# Altium footprint library ATK-CNN647B_V1.0.PcbLib: 22 footprints (part 1 of 2)
Each footprint in its own frame and in the unit in brackets; x right, y up, seen from the top. Pads: shape width x height; smd on the part's side, far side on the other; paste and mask are expansions set on the pad; w line width, h text height; cw(c..) or ccw(c..) is an arc to the next point about the centre after c.
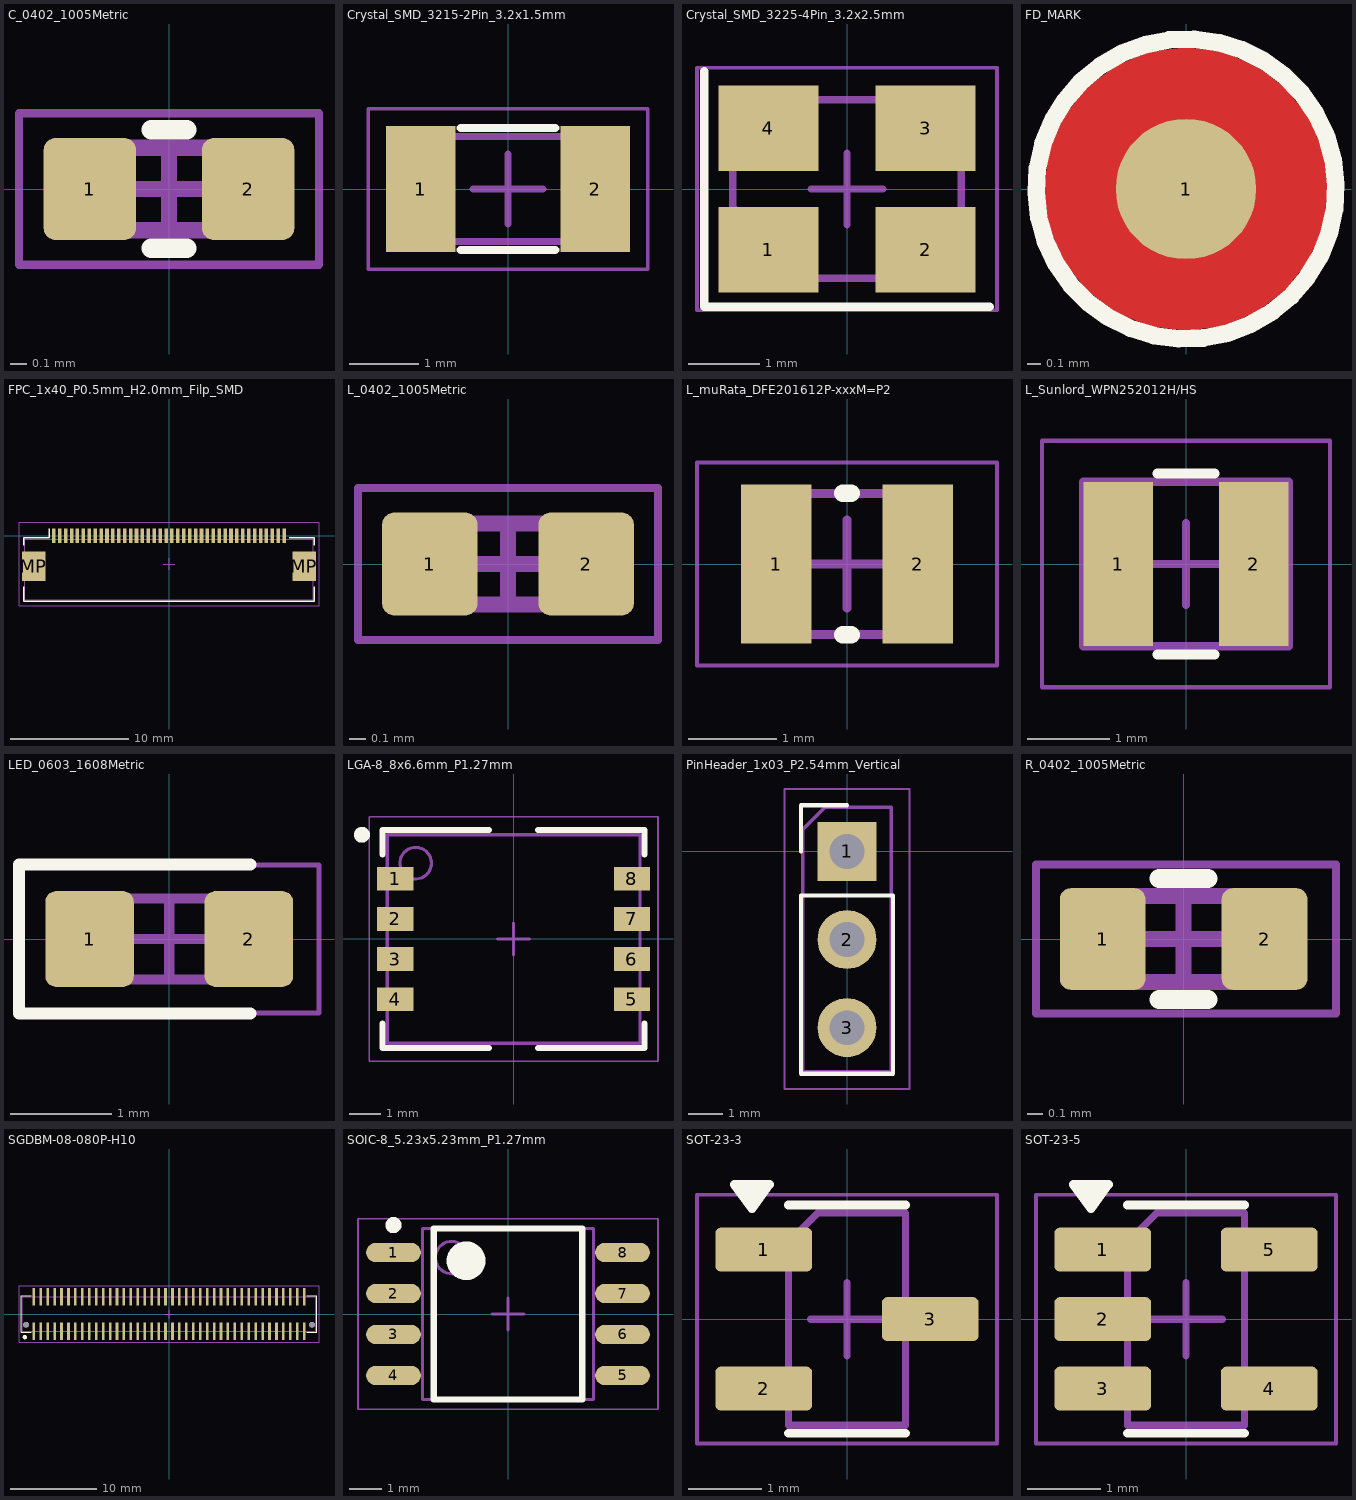
[diagram p0: the footprints below, top view; thin cyan lines are the x and y axes]

## C_0402_1005Metric [mm]
pads (2):
  rrect25% 0.56x0.62 smd: 1(-0.48,0) 2(0.48,0)
Top Overlay:
  lines w0.12: -0.108,-0.36 0.108,-0.36 ; -0.108,0.36 0.108,0.36
Mechanical 13:
  lines w0.1: -0.5,-0.25 -0.5,0.25 0.5,0.25 0.5,-0.25 -0.5,-0.25
Mechanical 15:
  lines w0.05: -0.91,-0.46 -0.91,0.46 0.91,0.46 0.91,-0.46 -0.91,-0.46
  lines w0.1: -0.25,0 0.25,0 ; 0,-0.25 0,0.25
3D body "C_0402_1005Metric.step": height 0.5, standoff 0, extent -0.5,-0.25 0.5,0.25

## Crystal_SMD_3215-2Pin_3.2x1.5mm [mm]
height 0.9
pads (2):
  rect 1x1.8 smd: 1(-1.25,0) 2(1.25,0)
Top Overlay:
  lines w0.12: -0.675,-0.875 0.675,-0.875 ; -0.675,0.875 0.675,0.875
Mechanical 13:
  lines w0.1: -1.6,-0.75 1.6,-0.75 1.6,0.75 -1.6,0.75 -1.6,-0.75
Mechanical 15:
  lines w0.05: -2,-1.15 -2,1.15 2,1.15 2,-1.15 -2,-1.15
  lines w0.1: -0.5,0 0.5,0 ; 0,-0.5 0,0.5
3D body "User Library-NDK_NX3215SA.STEP": height 0.8, standoff 0, extent -1.6,-0.75 1.6,0.75

## Crystal_SMD_3225-4Pin_3.2x2.5mm [mm]
height 0.9
pads (4):
  rect 1.4x1.2 smd: 1(-1.1,-0.85) 2(1.1,-0.85) 3(1.1,0.85) 4(-1.1,0.85)
Top Overlay:
  lines w0.12: -2,1.65 -2,-1.65 2,-1.65
Mechanical 13:
  lines w0.1: -1.6,-0.25 -1.6,1.25 1.6,1.25 1.6,-1.25 -0.6,-1.25 -1.6,-0.25
Mechanical 15:
  lines w0.05: -2.1,-1.7 -2.1,1.7 2.1,1.7 2.1,-1.7 -2.1,-1.7
  lines w0.1: -0.5,0 0.5,0 ; 0,-0.5 0,0.5
3D body "Crystal_SMD_3225-4Pin_3.2x2.5mm.step": height 0.64, standoff 0, extent -1.599,-1.251 1.601,1.25

## FD_MARK [mil]
height 39.37
pads (1):
  round 40 smd: 1(0,0)
Top Layer:
  pour cut-out: -40.43,0 -39.06,-10.47 -35.02,-20.22 -28.59,-28.59 -20.22,-35.02 -10.47,-39.06 0,-40.43 10.47,-39.06 20.22,-35.02 28.59,-28.59 35.02,-20.22 39.06,-10.47 40.43,0 39.06,10.47 35.02,20.22 28.59,28.59 20.22,35.02 10.47,39.06 0,40.43 -10.47,39.06 -20.22,35.02 -28.59,28.59 -35.02,20.22 -39.06,10.47
Top Overlay:
  lines w5: -40.03,-14.92 cw(c0,0) -39.9,-15.25
Top Solder:
  circle w30: c0,0 r24.49

## FPC_1x40_P0.5mm_H2.0mm_Filp_SMD [mm]
height 0.9
pads (42):
  rect 0.3x1.25 smd: 1(-9.75,0) 2(-9.25,0) 3(-8.75,0) 4(-8.25,0) 5(-7.75,0) 6(-7.25,0) 7(-6.75,0) 8(-6.25,0) 9(-5.75,0) 10(-5.25,0) 11(-4.75,0) 12(-4.25,0) 13(-3.75,0) 14(-3.25,0) 15(-2.75,0) 16(-2.25,0) 17(-1.75,0) 18(-1.25,0) 19(-0.75,0) 20(-0.25,0) 21(0.25,0) 22(0.75,0) 23(1.25,0) 24(1.75,0) 25(2.25,0) 26(2.75,0) 27(3.25,0) 28(3.75,0) 29(4.25,0) 30(4.75,0) 31(5.25,0) 32(5.75,0) 33(6.25,0) 34(6.75,0) 35(7.25,0) 36(7.75,0) 37(8.25,0) 38(8.75,0) 39(9.25,0) 40(9.75,0)
  rect 2x2.5 smd: MP(-11.44,-2.575) MP(11.44,-2.575)
Top Overlay:
  lines w0.12: -12.31,-4.325 -12.31,-5.535 12.31,-5.535 12.31,-4.325 ; -12.31,-0.825 -12.31,-0.195 -10.16,-0.195 -10.16,0.565 ; 10.16,-0.195 12.31,-0.195 12.31,-0.825
Mechanical 13:
  lines w0.1: -12.2,-5.425 12.2,-5.425 12.2,-0.305 -12.2,-0.305 -12.2,-5.425
Mechanical 15:
  lines w0.05: -12.7,-5.925 12.7,-5.925 12.7,1.125 -12.7,1.125 -12.7,-5.925
  lines w0.1: -0.5,-2.4 0.5,-2.4 ; 0,-2.9 0,-1.9
3D body "FPC_1x40_P0.5mm_H2.0mm_Filp_SMD v1.step": height 2, standoff 0, extent -12.2,-5.425 12.2,0.175

## L_0402_1005Metric [mm]
height 0.9
pads (2):
  rrect25% 0.59x0.64 smd: 1(-0.485,0) 2(0.485,0)
Mechanical 13:
  lines w0.1: -0.5,-0.25 0.5,-0.25 0.5,0.25 -0.5,0.25 -0.5,-0.25
Mechanical 15:
  lines w0.05: -0.93,-0.47 -0.93,0.47 0.93,0.47 0.93,-0.47 -0.93,-0.47
  lines w0.1: -0.25,0 0.25,0 ; 0,-0.25 0,0.25
3D body "L_0402_1005Metric.step": height 0.5, standoff 0, extent -0.5,-0.25 0.5,0.25

## L_muRata_DFE201612P-xxxM=P2 [mm]
height 1.2
pads (2):
  rect 0.8x1.8 smd: 1(-0.8,0) 2(0.8,0)
Top Overlay:
  lines w0.2: -0.05,-0.8 0.05,-0.8 ; -0.05,0.8 0.05,0.8
Mechanical 13:
  lines w0.1: -1,-0.8 1,-0.8 1,0.8 -1,0.8 -1,-0.8
Mechanical 15:
  lines w0.05: -1.7,-1.15 1.7,-1.15 1.7,1.15 -1.7,1.15 -1.7,-1.15
  lines w0.1: -0.5,0 0.5,0 ; 0,-0.5 0,0.5
3D body "Chip2PinSM127P600-8N.step": height 1.2, standoff 0, extent -1,-0.8 1,0.8

## L_Sunlord_WPN252012H/HS [mm]
height 1.2
pads (2):
  rect 0.85x2 smd: 1(-0.825,0) 2(0.825,0)
Top Overlay:
  lines w0.12: -0.35,-1.1 0.35,-1.1 ; -0.35,1.1 0.35,1.1
Mechanical 13:
  lines w0.1: -1.25,-1 1.25,-1 1.25,1 -1.25,1 -1.25,-1
Mechanical 15:
  lines w0.05: -1.75,-1.5 -1.75,1.5 1.75,1.5 1.75,-1.5 -1.75,-1.5
  lines w0.1: -0.5,0 0.5,0 ; 0,-0.5 0,0.5
3D body "L_Wuerth_MAPI-2512.step": height 1.2, standoff 0, extent -1.25,-1 1.25,1

## LED_0603_1608Metric [mm]
height 0.9
pads (2):
  rrect25% 0.875x0.95 smd: 1(-0.787,0) 2(0.787,0)
Top Overlay:
  lines w0.12: 0.8,-0.735 -1.485,-0.735 -1.485,0.735 0.8,0.735
Mechanical 13:
  lines w0.1: -0.8,-0.4 -0.8,0.1 -0.5,0.4 0.8,0.4 0.8,-0.4 -0.8,-0.4
Mechanical 15:
  lines w0.05: -1.48,-0.73 -1.48,0.73 1.48,0.73 1.48,-0.73 -1.48,-0.73
  lines w0.1: -0.4,0 0.4,0 ; 0,-0.4 0,0.4
3D body "LED_0603_1608Metric.step": height 1.1, standoff 0, extent -0.8,-0.4 0.8,0.4

## LGA-8_8x6.6mm_P1.27mm [mm]
height 0.85
pads (8):
  rect 1.15x0.75 smd: 1(-3.75,1.905) 2(-3.75,0.635) 3(-3.75,-0.635) 4(-3.75,-1.905) 5(3.75,-1.905) 6(3.75,-0.635) 7(3.75,0.635) 8(3.75,1.905)
Top Overlay:
  circle w0.25: c-4.8,3.3 r0.125
  lines w0.2: -4.15,-2.68 -4.15,-3.45 -0.775,-3.45 ; -4.15,2.68 -4.15,3.45 -0.775,3.45 ; 0.775,-3.45 4.15,-3.45 4.15,-2.68 ; 0.775,3.45 4.15,3.45 4.15,2.68
Mechanical 13:
  circle w0.1: c-3.1,2.4 r0.5
  lines w0.1: -4,-3.3 -4,3.3 4,3.3 4,-3.3 -4,-3.3
Mechanical 15:
  lines w0.05: -4.575,-3.875 -4.575,3.875 4.575,3.875 4.575,-3.875 -4.575,-3.875
  lines w0.1: -0.5,0 0.5,0 ; 0,-0.5 0,0.5
3D body "LGA-8_8x6.6mm_P1.27mm.step": height 0.85, standoff 0.01, extent -4,-3.3 4,3.3

## PinHeader_1x03_P2.54mm_Vertical [mm]
height 0.9
pads (3):
  rect 1.7x1.7 hole 1: 1(0,0)
  round 1.7 hole 1: 2(0,-2.54) 3(0,-5.08)
Top Overlay:
  lines w0.12: -1.33,0 -1.33,1.33 0,1.33 ; -1.33,-6.41 -1.33,-1.27 1.33,-1.27 1.33,-6.41 -1.33,-6.41
Mechanical 13:
  lines w0.1: -1.27,-6.35 -1.27,0.635 -0.635,1.27 1.27,1.27 1.27,-6.35 -1.27,-6.35
Mechanical 15:
  lines w0.05: -1.8,-6.85 1.8,-6.85 1.8,1.8 -1.8,1.8 -1.8,-6.85
  lines w0.1: -0.5,-2.525 0.5,-2.525 ; 0,-3.025 0,-2.025
3D body "PinHeader_1x03_P2.54mm_Vertical.step": height 8.54, standoff -3, extent -1.27,-6.35 1.27,1.27

## R_0402_1005Metric [mm]
height 0.9
pads (2):
  rrect25% 0.54x0.64 smd: 1(-0.51,0) 2(0.51,0)
Top Overlay:
  lines w0.12: -0.154,-0.38 0.154,-0.38 ; -0.154,0.38 0.154,0.38
Mechanical 13:
  lines w0.1: -0.525,-0.27 -0.525,0.27 0.525,0.27 0.525,-0.27 -0.525,-0.27
Mechanical 15:
  lines w0.05: -0.93,-0.47 0.96,-0.47 0.96,0.47 -0.93,0.47 -0.93,-0.47
  lines w0.1: -0.25,0 0.25,0 ; 0,-0.25 0,0.25
3D body "R_0402_1005Metric.step": height 0.35, standoff 0, extent -0.5,-0.25 0.5,0.25

## SGDBM-08-080P-H10 [mm]
pads (82):
  rect 0.3x2 smd: 1(-15.6,-2) 2(-14.8,-2) 3(-14,-2) 4(-13.2,-2) 5(-12.4,-2) 6(-11.6,-2) 7(-10.8,-2) 8(-10,-2) 9(-9.2,-2) 10(-8.4,-2) 11(-7.6,-2) 12(-6.8,-2) 13(-6,-2) 14(-5.2,-2) 15(-4.4,-2) 16(-3.6,-2) 17(-2.8,-2) 18(-2,-2) 19(-1.2,-2) 20(-0.4,-2) 21(0.4,-2) 22(1.2,-2) 23(2,-2) 24(2.8,-2) 25(3.6,-2) 26(4.4,-2) 27(5.2,-2) 28(6,-2) 29(6.8,-2) 30(7.6,-2) 31(8.4,-2) 32(9.2,-2) 33(10,-2) 34(10.8,-2) 35(11.6,-2) 36(12.4,-2) 37(13.2,-2) 38(14,-2) 39(14.8,-2) 40(15.6,-2) 41(15.6,2) 42(14.8,2) 43(14,2) 44(13.2,2) 45(12.4,2) 46(11.6,2) 47(10.8,2) 48(10,2) 49(9.2,2) 50(8.4,2) 51(7.6,2) 52(6.8,2) 53(6,2) 54(5.2,2) 55(4.4,2) 56(3.6,2) 57(2.8,2) 58(2,2) 59(1.2,2) 60(0.4,2) 61(-0.4,2) 62(-1.2,2) 63(-2,2) 64(-2.8,2) 65(-3.6,2) 66(-4.4,2) 67(-5.2,2) 68(-6,2) 69(-6.8,2) 70(-7.6,2) 71(-8.4,2) 72(-9.2,2) 73(-10,2) 74(-10.8,2) 75(-11.6,2) 76(-12.4,2) 77(-13.2,2) 78(-14,2) 79(-14.8,2) 80(-15.6,2)
  round 0.65 hole 0.65 unplated: ""(-16.5,-1.25) ""(16.5,-1.25)
Top Overlay:
  circle w0.25: c-16.637,-2.667 r0.125
  lines w0.12: -15.912,-2.11 -17.06,-2.11 -17.06,2.11 -15.912,2.11 ; 15.912,-2.11 17.06,-2.11 17.06,2.11 15.912,2.11
Mechanical 13:
  lines w0.1: -16.95,-2 16.95,-2 16.95,2 -16.95,2 -16.95,-2
Mechanical 15:
  lines w0.05: -17.31,-3.25 -17.31,3.25 17.31,3.25 17.31,-3.25 -17.31,-3.25
  lines w0.1: -0.5,0 0.5,0 ; 0,-0.5 0,0.5
3D body "SGDBM-08-080P-H10.step": height 2.9, standoff -0.6, extent -16.95,-2.6 16.95,2.6

## SOIC-8_5.23x5.23mm_P1.27mm [mm]
height 2.16
pads (8):
  oval 1.7x0.6 smd: 1(-3.55,1.905) 2(-3.55,0.635) 3(-3.55,-0.635) 4(-3.55,-1.905) 5(3.55,-1.905) 6(3.55,-0.635) 7(3.55,0.635) 8(3.55,1.905)
Top Overlay:
  circle w0.6: c-1.3,1.65 r0.3
  circle w0.25: c-3.55,2.755 r0.125
  lines w0.2: -2.3,-2.65 2.3,-2.65 2.3,2.65 -2.3,2.65 -2.3,-2.65
Mechanical 13:
  circle w0.1: c-1.75,1.75 r0.5
  lines w0.1: -2.65,-2.65 2.65,-2.65 2.65,2.65 -2.65,2.65 -2.65,-2.65
Mechanical 15:
  lines w0.05: -4.65,-2.95 4.65,-2.95 4.65,2.95 -4.65,2.95 -4.65,-2.95
  lines w0.1: -0.5,0 0.5,0 ; 0,-0.5 0,0.5
3D body "SOIC-8_5.23x5.23mm_P1.27mm.step": height 2.16, standoff 0, extent -3.95,-2.65 3.95,2.65

## SOT-23-3 [mm]
height 0.9
pads (3):
  rrect25% 1.325x0.6 smd: 1(-1.138,0.95) 2(-1.138,-0.95) 3(1.138,0)
Top Overlay:
  region: -1.54,1.84 -1.06,1.84 -1.3,1.51
  lines w0.12: -0.8,-1.56 0.8,-1.56 ; -0.8,1.56 0.8,1.56 ; -1.54,1.84 -1.3,1.51 -1.06,1.84 -1.54,1.84
Mechanical 13:
  lines w0.1: -0.8,-1.45 -0.8,1.05 -0.4,1.45 0.8,1.45 0.8,-1.45 -0.8,-1.45
Mechanical 15:
  lines w0.05: -2.05,-1.7 -2.05,1.7 2.05,1.7 2.05,-1.7 -2.05,-1.7
  lines w0.1: -0.5,0 0.5,0 ; 0,-0.5 0,0.5
3D body "SOT-23-3.step": height 1.2, standoff 0, extent -1.25,-1.5 1.25,1.5

## SOT-23-5 [mm]
height 0.9
pads (5):
  rrect25% 1.325x0.6 smd: 1(-1.138,0.95) 2(-1.138,0) 3(-1.138,-0.95) 4(1.138,-0.95) 5(1.138,0.95)
Top Overlay:
  region: -1.54,1.84 -1.06,1.84 -1.3,1.51
  lines w0.12: -0.8,-1.56 0.8,-1.56 ; -0.8,1.56 0.8,1.56 ; -1.54,1.84 -1.3,1.51 -1.06,1.84 -1.54,1.84
Mechanical 13:
  lines w0.1: -0.8,-1.45 -0.8,1.05 -0.4,1.45 0.8,1.45 0.8,-1.45 -0.8,-1.45
Mechanical 15:
  lines w0.05: -2.05,-1.7 -2.05,1.7 2.05,1.7 2.05,-1.7 -2.05,-1.7
  lines w0.1: -0.5,0 0.5,0 ; 0,-0.5 0,0.5
3D body "SOT-23-5.step": height 1.55, standoff 0, extent -1.4,-1.45 1.4,1.45